# Altium footprint library 8SS1012Z.PcbLib: 1 footprints
Each footprint in its own frame and in the unit in brackets; x right, y up, seen from the top. Pads: shape width x height; smd on the part's side, far side on the other; paste and mask are expansions set on the pad; w line width, h text height; cw(c..) or ccw(c..) is an arc to the next point about the centre after c.
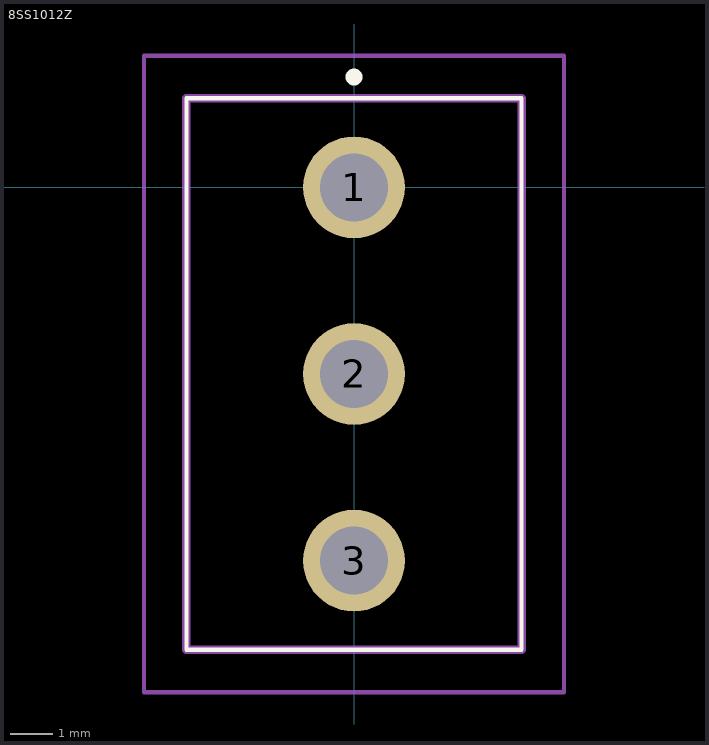
[diagram p0: the footprint, top view; thin cyan lines are the x and y axes]

## 8SS1012Z [mm]
pads (3):
  round 2.4 hole 1.6: 1(0,0) 2(0,-4.4) 3(0,-8.8)
Top Overlay:
  lines w0.1: -3.95,-10.9 3.95,-10.9 3.95,2.1 -3.95,2.1 -3.95,-10.9
  lines w0.2: 0,2.5 0,2.5 ; 0,2.5 ccw(c0,2.6) 0,2.7 ; 0,2.5 cw(c0,2.6) 0,2.7 ; 0,2.7 0,2.7
Mechanical 15:
  lines w0.2: -3.95,-10.9 3.95,-10.9 3.95,2.1 -3.95,2.1 -3.95,-10.9
Mechanical 20:
  lines w0.1: -4.95,-11.9 4.95,-11.9 4.95,3.1 -4.95,3.1 -4.95,-11.9